# Altium footprint library Radolovic_PCB_Library.PcbLib: 38 footprints (part 2 of 3)
Each footprint in its own frame and in the unit in brackets; x right, y up, seen from the top. Pads: shape width x height; smd on the part's side, far side on the other; paste and mask are expansions set on the pad; w line width, h text height; cw(c..) or ccw(c..) is an arc to the next point about the centre after c.
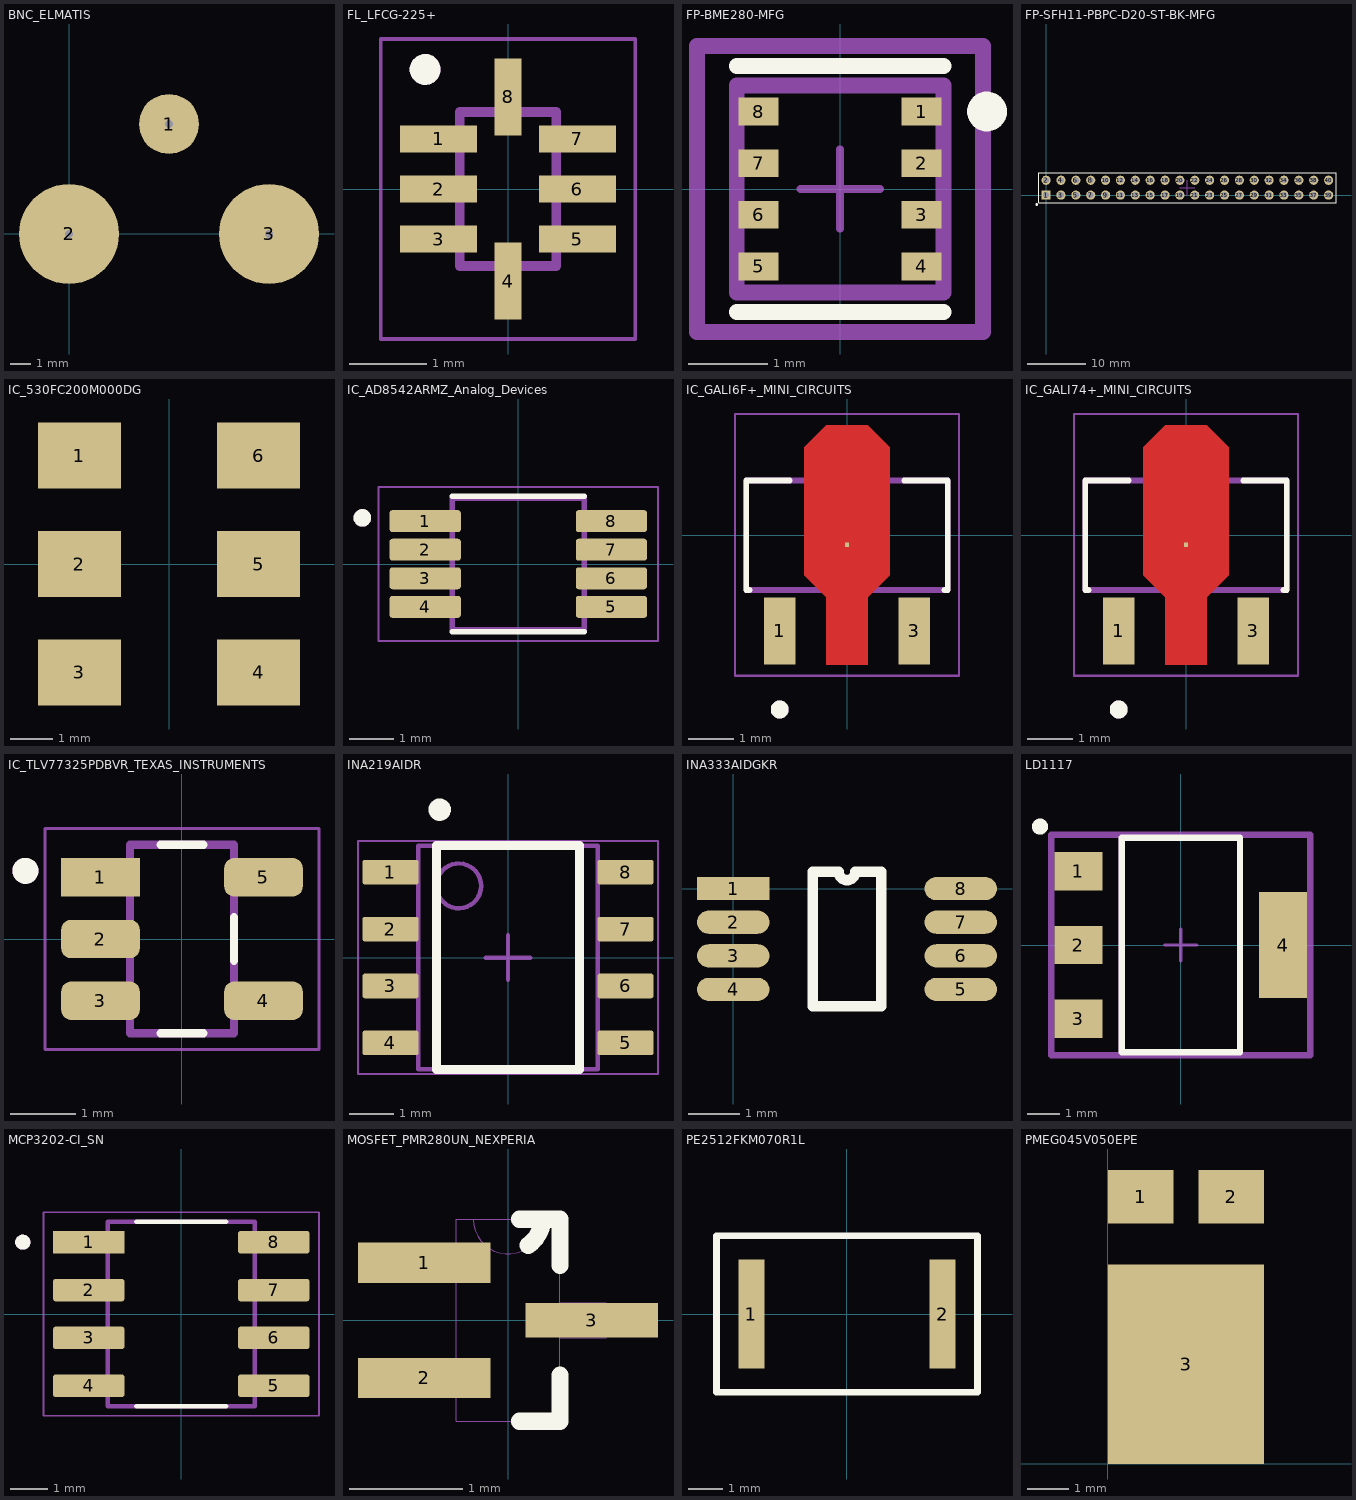
[diagram p1: the footprints below, top view; thin cyan lines are the x and y axes]

## BNC_ELMATIS [mm]
pads (3):
  round 3 hole 0.4: 1(5,5.5)
  round 5 hole 0.4: 2(0,0) 3(10,0)

## FL_LFCG-225+ [mm] "Signal Conditioning LTCC SMT Low Pass Filter, DC - 225 MHz, 50ohm"
pads (8):
  rect 1x0.35 smd mask+0: 1(-0.9,0.65) 2(-0.9,0) 3(-0.9,-0.65) 5(0.9,-0.65) 6(0.9,0) 7(0.9,0.65)
  rect 0.35x1 smd mask+0: 4(0,-1.195) 8(0,1.195)
Top Overlay:
  circle w0.2: c-1.075,1.55 r0.1
Top Solder:
  region: -0.4,-0.175 -1.4,-0.175 -1.4,0.175 -0.4,0.175
  region: 1.4,-0.175 0.4,-0.175 0.4,0.175 1.4,0.175
  region: -0.4,-0.825 -1.4,-0.825 -1.4,-0.475 -0.4,-0.475
  region: -0.4,0.475 -1.4,0.475 -1.4,0.825 -0.4,0.825
  region: 1.4,-0.825 0.4,-0.825 0.4,-0.475 1.4,-0.475
  region: 1.4,0.475 0.4,0.475 0.4,0.825 1.4,0.825
  region: 0.175,-1.695 -0.175,-1.695 -0.175,-0.695 0.175,-0.695
  region: 0.175,0.695 -0.175,0.695 -0.175,1.695 0.175,1.695
Mechanical 13:
  circle w0.2: c-1.075,1.55 r0.1
  lines w0.127: -0.625,-1 -0.625,1 0.625,1 0.625,-1 -0.625,-1
Mechanical 15:
  lines w0.05: -1.65,-1.945 1.65,-1.945 1.65,1.945 -1.65,1.945 -1.65,-1.945
3D body "LFCG-225+.STEP": height 1.15, standoff 0, extent -0.625,-1 0.625,1

## FP-BME280-MFG [mm]
pads (8):
  rect 0.5x0.35 smd paste+0 mask+0: 1(1.025,0.975) 2(1.025,0.325) 3(1.025,-0.325) 4(1.025,-0.975) 5(-1.025,-0.975) 6(-1.025,-0.325) 7(-1.025,0.325) 8(-1.025,0.975)
Top Overlay:
  circle w0.25: c1.85,0.975 r0.125
  lines w0.2: -1.3,-1.55 1.3,-1.55 ; -1.3,1.55 1.3,1.55
Top 3D Body:
  lines w0.2: -1.3,-1.3 1.3,-1.3 1.3,1.3 -1.3,1.3 -1.3,-1.3
Top Courtyard:
  lines w0.2: -1.8,-1.8 1.8,-1.8 1.8,1.8 -1.8,1.8 -1.8,-1.8
Top Assembly:
  lines w0.2: -1.8,-1.8 1.8,-1.8 1.8,1.8 -1.8,1.8 -1.8,-1.8
  text ".Designator" at 0,0 h1
Top Component Center:
  lines w0.1: -0.5,0 0.5,0 ; 0,-0.5 0,0.5
3D body "BME280--3DModel-STEP-56544.STEP": height 1, standoff 0, extent -1.25,-1.25 1.25,1.25

## FP-SFH11-PBPC-D20-ST-BK-MFG [mm]
pads (40):
  rect 1.57x1.57 hole 1.02 paste-2539.97: 1(0,0)
  round 1.57 hole 1.02 paste-2539.97: 2(0,2.54) 3(2.54,0) 4(2.54,2.54) 5(5.08,0) 6(5.08,2.54) 7(7.62,0) 8(7.62,2.54) 9(10.16,0) 10(10.16,2.54) 11(12.7,0) 12(12.7,2.54) 13(15.24,0) 14(15.24,2.54) 15(17.78,0) 16(17.78,2.54) 17(20.32,0) 18(20.32,2.54) 19(22.86,0) 20(22.86,2.54) 21(25.4,0) 22(25.4,2.54) 23(27.94,0) 24(27.94,2.54) 25(30.48,0) 26(30.48,2.54) 27(33.02,0) 28(33.02,2.54) 29(35.56,0) 30(35.56,2.54) 31(38.1,0) 32(38.1,2.54) 33(40.64,0) 34(40.64,2.54) 35(43.18,0) 36(43.18,2.54) 37(45.72,0) 38(45.72,2.54) 39(48.26,0) 40(48.26,2.54)
Top Overlay:
  circle w0.25: c-1.6,-1.6 r0.125
  lines w0.2: -1.27,-1.262 -1.27,3.818 49.53,3.818 49.53,-1.262 -1.27,-1.262
Mechanical 1:
  lines w0.127: 22.86,1.27 25.4,1.27 ; 24.13,0 24.13,2.54

## IC_530FC200M000DG [mm] "Standard Clock Oscillators Differential/single-ended; single frequency XO; OE pin 2 (pin 1 for CMOS); 10-1417 MHz"
height 1.65
pads (6):
  rect 1.95x1.55 smd: 1(-2.1,2.54) 2(-2.1,0) 3(-2.1,-2.54) 4(2.1,-2.54) 5(2.1,0) 6(2.1,2.54)

## IC_AD8542ARMZ_Analog_Devices [mm]
pads (8):
  rrect25% 1.62x0.5 smd: 1(-2.12,0.975) 2(-2.12,0.325) 3(-2.12,-0.325) 4(-2.12,-0.975) 5(2.12,-0.975) 6(2.12,-0.325) 7(2.12,0.325) 8(2.12,0.975)
Top Overlay:
  circle w0.2: c-3.55,1.05 r0.1
  lines w0.127: -1.5,-1.545 1.5,-1.545 ; -1.5,1.545 1.5,1.545
Mechanical 13:
  circle w0.2: c-3.55,1.05 r0.1
  lines w0.127: -1.5,-1.5 -1.5,1.5 1.5,1.5 1.5,-1.5 -1.5,-1.5
Mechanical 15:
  lines w0.05: -3.18,-1.75 -3.18,1.75 3.18,1.75 3.18,-1.75 -3.18,-1.75
3D body "step_temp.STEP": height 1.1, standoff 0, extent -2.45,-1.5 2.45,1.5

## IC_GALI6F+_MINI_CIRCUITS [mil] "RF Amplifier ML AMPL / SURF MT / RoHS"
pads (3):
  rect 28x59 smd: 1(-59,-84) 3(59,-84)
  rect 3.94x3.94 smd paste-39.37 mask+0: 2_4(0,-8.5)
Top Layer:
  region: 37.5,77 37.5,-35 18,-54.5 18,-113.5 -18,-113.5 -18,-54.5 -37.5,-35 -37.5,77 -18,96.5 18,96.5
Top Overlay:
  circle w7.87: c-59,-152.87 r3.94
  lines w5: -85.6,-48 -88.5,-48 -88.5,48 -50.12,48 ; 50.12,48 88.5,48 88.5,-48 85.6,-48
Top Paste:
  region: 37.5,77 37.5,-35 18,-54.5 18,-113.5 -18,-113.5 -18,-54.5 -37.5,-35 -37.5,77 -18,96.5 18,96.5
Top Solder:
  region: 41.44,78.97 41.44,-36.97 21.94,-56.47 21.94,-117.44 -21.94,-117.44 -21.94,-56.47 -41.44,-36.97 -41.44,78.97 -19.97,100.44 19.97,100.44
Mechanical 13:
  circle w7.87: c-59,-152.87 r3.94
  lines w5: -88.5,-48 -88.5,48 88.5,48 88.5,-48 -88.5,-48
Mechanical 15:
  lines w1.97: -98.34,-123.35 98.34,-123.35 98.34,106.34 -98.34,106.34 -98.34,-123.35
3D body "step_temp.STEP": height 62.99, standoff 0, extent -88.58,-100.3 88.58,60.93

## IC_GALI74+_MINI_CIRCUITS [mil] "RF Amplifier ML AMPL / SURF MT / RoHS"
pads (4):
  rect 28x59 smd: 1(-59,-84) 3(59,-84)
  round 1 smd: 2(0,-8.5)
  rect 3.94x3.94 smd paste-39.37 mask+0: 2_4(0,-8.5)
Top Layer:
  region: 37.5,77 37.5,-35 18,-54.5 18,-113.5 -18,-113.5 -18,-54.5 -37.5,-35 -37.5,77 -18,96.5 18,96.5
Top Overlay:
  circle w7.87: c-59,-152.87 r3.94
  lines w5: -85.6,-48 -88.5,-48 -88.5,48 -50.12,48 ; 50.12,48 88.5,48 88.5,-48 85.6,-48
Top Paste:
  region: 37.5,77 37.5,-35 18,-54.5 18,-113.5 -18,-113.5 -18,-54.5 -37.5,-35 -37.5,77 -18,96.5 18,96.5
Top Solder:
  region: 41.44,78.97 41.44,-36.97 21.94,-56.47 21.94,-117.44 -21.94,-117.44 -21.94,-56.47 -41.44,-36.97 -41.44,78.97 -19.97,100.44 19.97,100.44
Mechanical 13:
  circle w7.87: c-59,-152.87 r3.94
  lines w5: -88.5,-48 -88.5,48 88.5,48 88.5,-48 -88.5,-48
Mechanical 15:
  lines w1.97: -98.34,-123.35 98.34,-123.35 98.34,106.34 -98.34,106.34 -98.34,-123.35
3D body "step_temp.STEP": height 62.99, standoff 0, extent -88.58,-100.3 88.58,60.93

## IC_TLV77325PDBVR_TEXAS_INSTRUMENTS [mm] "LDO Voltage Regulators 300-mA high-PSRR low -IQ low-dropout regulator"
pads (5):
  rect 1.21x0.59 smd: 1(-1.255,0.95)
  rrect50% 1.21x0.59 smd: 2(-1.255,0) 3(-1.255,-0.95) 4(1.255,-0.95) 5(1.255,0.95)
Top Overlay:
  circle w0.2: c-2.41,1.05 r0.1
  lines w0.127: -0.33,-1.45 0.33,-1.45 ; -0.33,1.45 0.33,1.45 ; 0.8,-0.335 0.8,0.335
Mechanical 13:
  circle w0.2: c-2.41,1.05 r0.1
  lines w0.127: -0.8,-1.45 0.8,-1.45 0.8,1.45 -0.8,1.45 -0.8,-1.45
Mechanical 15:
  lines w0.05: -2.11,-1.7 -2.11,1.7 2.11,1.7 2.11,-1.7 -2.11,-1.7
3D body "INA180A3IDBVR--3DModel-STEP-1.step": height 1.46, standoff 0.01, extent -1.425,-1.45 1.375,1.45

## INA219AIDR [mm] "SOIC, 8-Leads, Body 5x4mm, Pitch 1.27mm, IPC High Density"
height 1.75
pads (8):
  rrect18% 1.25x0.55 smd: 1(-2.625,1.905) 2(-2.625,0.635) 3(-2.625,-0.635) 4(-2.625,-1.905) 5(2.625,-1.905) 6(2.625,-0.635) 7(2.625,0.635) 8(2.625,1.905)
Top Overlay:
  circle w0.25: c-1.524,3.302 r0.125
  lines w0.2: -1.6,-2.5 1.6,-2.5 1.6,2.5 -1.6,2.5 -1.6,-2.5
Mechanical 1:
  text ".Designator" at -1.397,-0.254 h0.6
Mechanical 13:
  circle w0.1: c-1.1,1.6 r0.5
  lines w0.1: -2,-2.5 2,-2.5 2,2.5 -2,2.5 -2,-2.5
Mechanical 15:
  lines w0.05: -3.35,-2.6 3.35,-2.6 3.35,2.6 -3.35,2.6 -3.35,-2.6
  lines w0.1: -0.5,0 0.5,0 ; 0,-0.5 0,0.5
3D body "SOIC-8akaD0008AakaM08A.stp": height 1.63, standoff 0, extent -3,-2.45 3,2.45

## INA333AIDGKR [mm] "INA333AIDGKR / TSSOP-8"
pads (8):
  rect 1.4x0.45 smd: 1(0,0)
  oval 1.4x0.45 smd: 2(0,-0.65) 3(0,-1.3) 4(0,-1.95) 5(4.4,-1.95) 6(4.4,-1.3) 7(4.4,-0.65) 8(4.4,0)
Top Overlay:
  lines w0.2: 1.535,-2.275 2.865,-2.275 2.865,0.325 2.362,0.325 cw(c2.2,0.325) 2.037,0.325 1.535,0.325 1.535,-2.275
3D body "INA333--3DModel-STEP-56544.STEP": height 1.1, standoff 0, extent -0.25,-2.475 4.65,0.525

## LD1117 [mm]
pads (4):
  rect 1.5x1.2 smd paste+0: 1(-3.2,2.3) 2(-3.2,0) 3(-3.2,-2.3)
  rect 1.5x3.3 smd paste+0: 4(3.2,0)
Top Overlay:
  circle w0.25: c-4.4,3.7 r0.125
  lines w0.2: -1.85,-3.35 1.85,-3.35 1.85,3.35 -1.85,3.35 -1.85,-3.35
Top 3D Body:
  lines w0.2: -1.85,-3.35 1.85,-3.35 1.85,3.35 -1.85,3.35 -1.85,-3.35
Top Courtyard:
  lines w0.2: -4.05,-3.45 4.05,-3.45 4.05,3.45 -4.05,3.45 -4.05,-3.45
Top Assembly:
  lines w0.2: -4.05,-3.45 4.05,-3.45 4.05,3.45 -4.05,3.45 -4.05,-3.45
  text ".Designator" at 0,0.188 h1
Top Component Center:
  lines w0.1: -0.5,0 0.5,0 ; 0,-0.5 0,0.5
3D body "IC_STMicroelectronics_LDL1117S50R_eec.STEP": height 0.25, standoff 0, extent -4.05,-3.45 4.05,3.45

## MCP3202-CI_SN [mm] "MCP3202-CI_SN / SOIC-8"
pads (8):
  rect 1.9x0.6 smd: 1(-2.455,1.905)
  rrect25% 1.9x0.6 smd: 2(-2.455,0.635) 3(-2.455,-0.635) 4(-2.455,-1.905) 5(2.455,-1.905) 6(2.455,-0.635) 7(2.455,0.635) 8(2.455,1.905)
Top Overlay:
  circle w0.2: c-4.205,1.905 r0.1
  lines w0.127: -1.185,-2.45 1.185,-2.45 ; -1.185,2.45 1.185,2.45
Mechanical 13:
  circle w0.2: c-4.205,1.905 r0.1
  lines w0.127: -1.95,-2.45 1.95,-2.45 1.95,2.45 -1.95,2.45 -1.95,-2.45
Mechanical 15:
  lines w0.05: -3.655,-2.7 -3.655,2.7 3.655,2.7 3.655,-2.7 -3.655,-2.7
3D body "step_temp.STEP": height 1.75, standoff 0, extent -3,-2.45 3,2.45

## MOSFET_PMR280UN_NEXPERIA [mil] "N-channel mTrenchMOS ultra low level FET"
pads (3):
  rect 46x14 smd: 1(-29,20) 2(-29,-20)
  rect 46x12 smd: 3(29,0)
Top Overlay:
  lines w6: 4,-35 18,-35 18,-19 ; 4,35 12,35 ; 7.01,26.01 ccw(c0.27,35.63) 12,35.01 ; 18,19 18,35 12,35
Mechanical 13:
  lines w0: -18,-26 -34,-26 -34,-14 -18,-14 ; -18,-26 -18,-14 ; -18,-26 -18,-35 18,-35 18,-6 ; -18,-14 -18,14 ; -18,14 -34,14 -34,26 -18,26 ; -18,14 -18,26 ; -18,26 -18,35 -12,35 ; -12,35 ccw(c0,35) 12,35 ; -12,35 12,35 ; 12,35 18,35 18,6 ; 18,-6 34,-6 34,6 18,6 ; 18,-6 18,6
3D body "S2SA1774G.STEP": height 35.43, standoff 0, extent -32.48,-31.5 30.51,31.5

## PE2512FKM070R1L [mm]
pads (2):
  rect 0.76x3.18 smd: 1(-2.795,0) 2(2.795,0)
Top Overlay:
  lines w0.2: -3.81,-2.286 3.81,-2.286 3.81,2.286 -3.81,2.286 -3.81,0 -3.81,-2.286

## PMEG045V050EPE [mm]
pads (3):
  rect 1.6x1.3 smd: 1(0.8,6.5) 2(3,6.5)
  rect 3.8x4.85 smd: 3(1.9,2.425)